# Altium schematic symbol library LCD.SchLib: 7 symbols
Pins are listed as number, name and electrical type; pins without a type are passive.

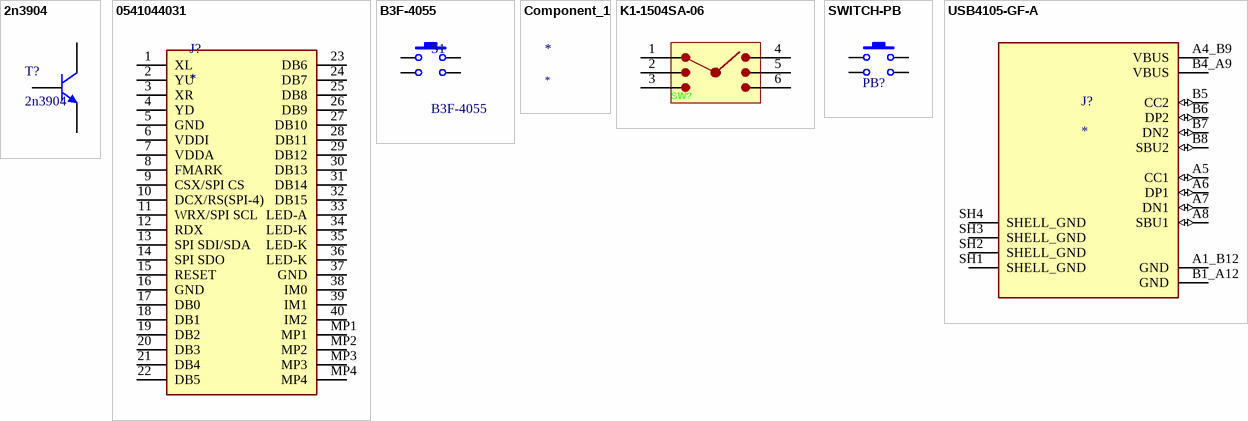
[diagram p0: symbols 2n3904 to USB4105-GF-A]

## 2n3904
designator T?
Mark: 1A
footprint SOT-23-3 (SOT-23 3PIN)
pins: 1 C, 2 E, 3 B

## 0541044031
designator J?
Connector; Manufacturer_Name: Molex; Manufacturer_Part_Number: 0541044031; Datasheet Link: https://www.molex.com/en-us/products/part-detail-pdf/541044031?display=pdf; Height: 2.2mm; Mouser Part Number: N/A; Mouser Price/Stock: https://www.mouser.co.uk/ProductDetail/Molex/0541044031?qs=PBcRNPEHKsok6%2FPBDHj5lQ%3D%3D; Arrow Part Number: 0541044031; Arrow Price/Stock: https://www.arrow.com/en/products/0541044031/molex?utm_currency=USD&region=nac
footprint 0541044031
pins: 1 XL, 2 YU, 3 XR, 4 YD, 5 GND, 6 VDDI, 7 VDDA, 8 FMARK, 9 CSX/SPI CS, 10 DCX/RS(SPI-4), 11 WRX/SPI SCL, 12 RDX, 13 SPI SDI/SDA, 14 SPI SDO, 15 RESET, 16 GND, 17 DB0, 18 DB1, 19 DB2, 20 DB3, 21 DB4, 22 DB5, 23 DB6, 24 DB7, 25 DB8, 26 DB9, 27 DB10, 28 DB11, 29 DB12, 30 DB13, 31 DB14, 32 DB15, 33 LED-A, 34 LED-K, 35 LED-K, 36 LED-K, 37 GND, 38 IM0, 39 IM1, 40 IM2, MP1, MP2, MP3, MP4

## B3F-4055
designator S1
Switch; Manufacturer_Name: OMRON Electronics; Datasheet Link: https://components.omron.com/us-en/sites/components.omron.com.us/files/datasheet_pdf/A070-E1.pdf; Height: 7.5mm; Manufacturer_Part_Number: B3F-4055; Mouser Part Number: 653-B3F-4055; Mouser Price/Stock: https://www.mouser.co.uk/ProductDetail/Omron-Electronics/B3F-4055?qs=B3tblJ0Nlt%2FdFVcSHGFuxQ%3D%3D; Arrow Part Number: B3F-4055; Arrow Price/Stock: https://www.arrow.com/en/products/b3f4055/omron
footprint B3F4055
pins: 1, 2, 3, 4

## Component_1
designator *

## K1-1504SA-06
designator SW?  (value not drawn)
Manufacturer: 韩国韩荣; Add into BOM: yes; Symbol: K1-1504SA-06; Device: K1-1504SA-06; LCSC Part Name: K1-1504SA-06; Supplier Part: C136712; Manufacturer Part: K1-1504SA-06; Supplier Footprint: SMD,10x10mm; JLCPCB Part Class: Extended Part; Datasheet: https://item.szlcsc.com/datasheet/K1-1504SA-06/148028.html; Supplier: LCSC; Convert to PCB: yes; manufactu: *
footprint SW-SMD_K1-1504SA-06
3D model SW-SMD_K1-1504SA-06
pins: 1 COM, 2 COM, 3 COM, 4 COM, 5 COM, 6 COM

## SWITCH-PB
designator PB?, comment Push Button  (value not drawn)
footprint PB-SMD-3
footprint PB-SMD-1
footprint PB-SMD-2
footprint PB-1 (SHORT PUSH BUTTON)
footprint PB-2
footprint PB-3 (12mmx12mm)
pins: 1, 2, 3, 4

## USB4105-GF-A
designator J?
MF: {'manufacturer': u'GCT'}; MP: USB4105-GF-A; Package: None; Price: None; Value: *; Availability: Unavailable
footprint GCT_USB4105-GF-A
pins: A1_B12 GND (power), A4_B9 VBUS (power), A5 CC1 (io), A6 DP1 (io), A7 DN1 (io), A8 SBU1 (io), B1_A12 GND (power), B4_A9 VBUS (power), B5 CC2 (io), B6 DP2 (io), B7 DN2 (io), B8 SBU2 (io), SH1 SHELL_GND (power), SH2 SHELL_GND (power), SH3 SHELL_GND (power), SH4 SHELL_GND (power)